# Altium footprint library Amin-Library.PcbLib: 601 footprints (part 12 of 38)
Each footprint in its own frame and in the unit in brackets; x right, y up, seen from the top. Pads: shape width x height; smd on the part's side, far side on the other; paste and mask are expansions set on the pad; w line width, h text height; cw(c..) or ccw(c..) is an arc to the next point about the centre after c.
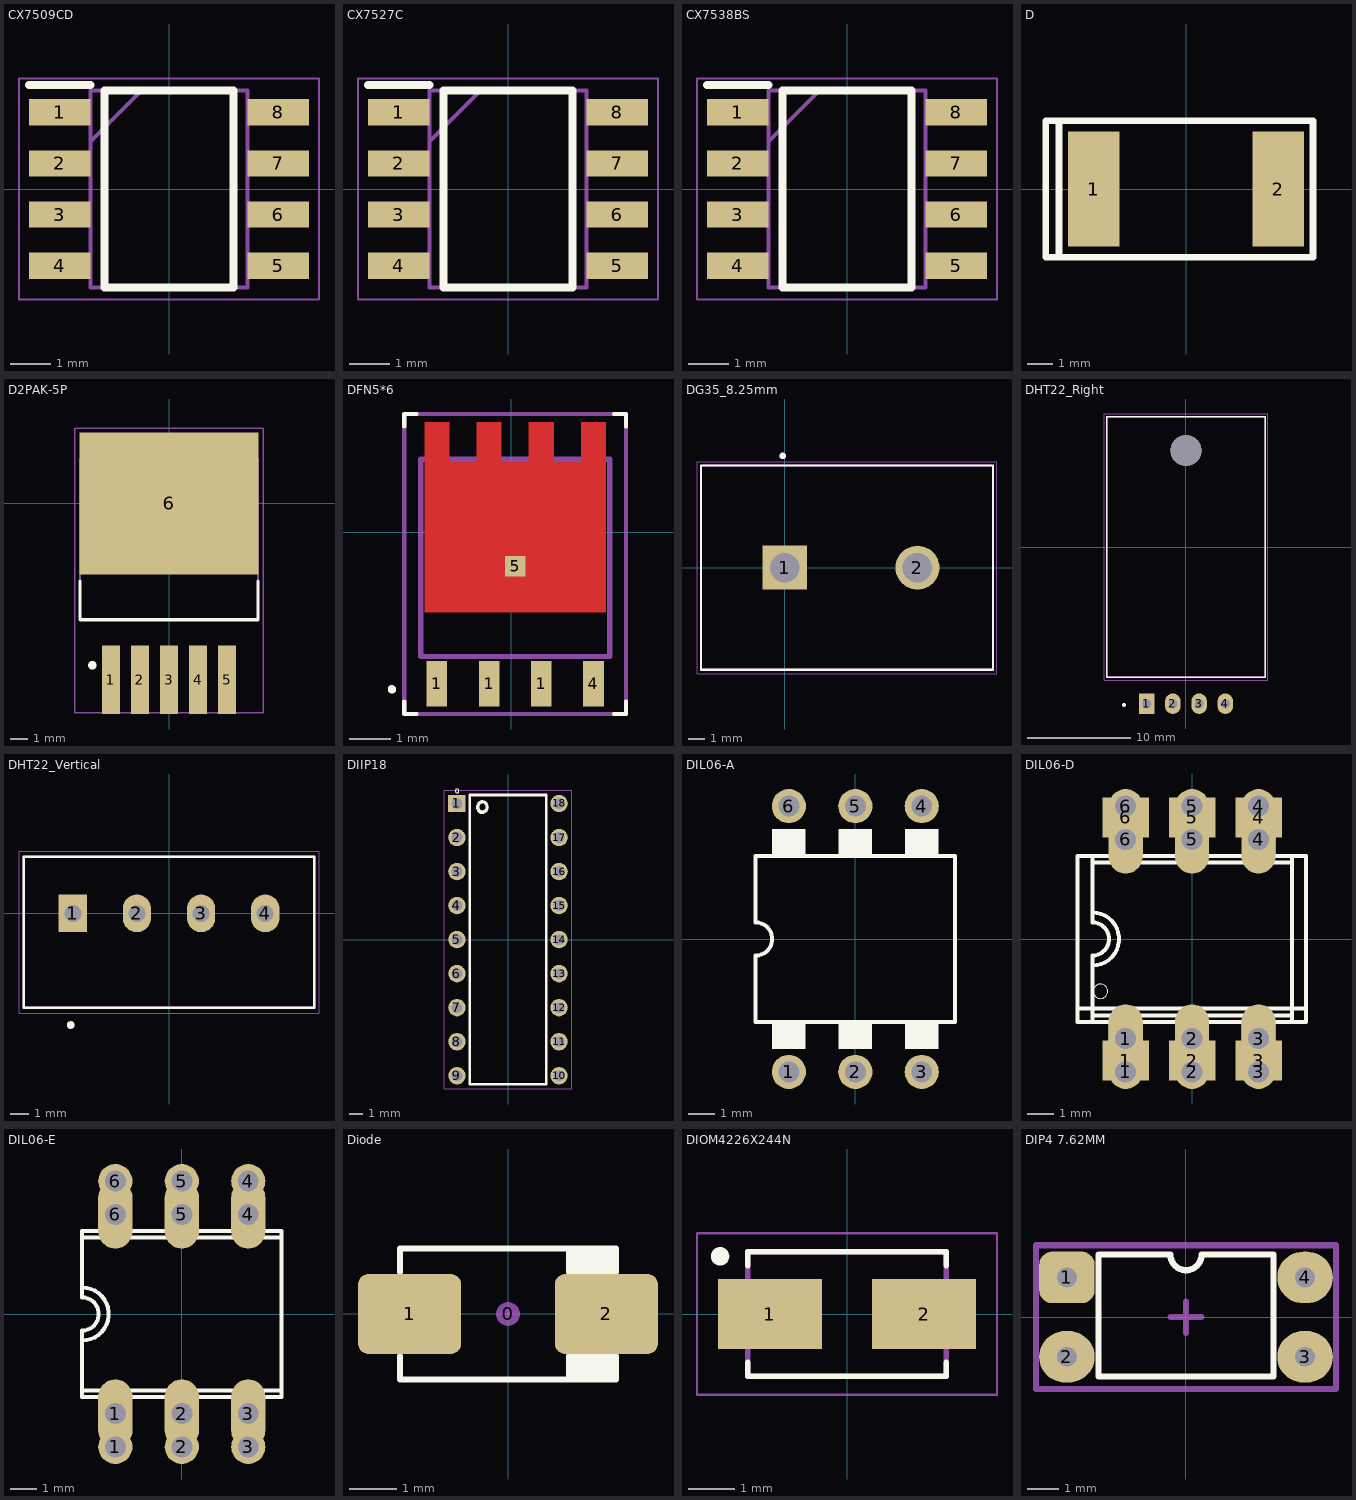
[diagram p11: the footprints below, top view; thin cyan lines are the x and y axes]

## CX7509CD [mm] "SOP8"
pads (8):
  rect 1.525x0.65 smd: 1(-2.712,1.905) 2(-2.712,0.635) 3(-2.712,-0.635) 4(-2.712,-1.905) 5(2.712,-1.905) 6(2.712,-0.635) 7(2.712,0.635) 8(2.712,1.905)
Top Overlay:
  lines w0.2: -3.475,2.58 -1.95,2.58 ; -1.6,-2.45 -1.6,2.45 1.6,2.45 1.6,-2.45 -1.6,-2.45
Mechanical 13:
  lines w0.1: -1.95,1.18 -0.68,2.45 ; -1.95,-2.45 -1.95,2.45 1.95,2.45 1.95,-2.45 -1.95,-2.45
Mechanical 15:
  lines w0.05: -3.725,-2.75 -3.725,2.75 3.725,2.75 3.725,-2.75 -3.725,-2.75
3D body "FR9886SOGTR.stp": height 1.75, standoff 0, extent -3,-2.45 3,2.45

## CX7527C [mm] "SOP8"
pads (8):
  rect 1.525x0.65 smd: 1(-2.712,1.905) 2(-2.712,0.635) 3(-2.712,-0.635) 4(-2.712,-1.905) 5(2.712,-1.905) 6(2.712,-0.635) 7(2.712,0.635) 8(2.712,1.905)
Top Overlay:
  lines w0.2: -3.475,2.58 -1.95,2.58 ; -1.6,-2.45 1.6,-2.45 1.6,2.45 -1.6,2.45 -1.6,-2.45
Mechanical 13:
  lines w0.1: -1.95,1.18 -0.68,2.45 ; -1.95,-2.45 1.95,-2.45 1.95,2.45 -1.95,2.45 -1.95,-2.45
Mechanical 15:
  lines w0.05: -3.725,-2.75 3.725,-2.75 3.725,2.75 -3.725,2.75 -3.725,-2.75
3D body "FR9886SOGTR.stp": height 1.75, standoff 0, extent -3,-2.45 3,2.45

## CX7538BS [mm] "SOP8"
pads (8):
  rect 1.525x0.65 smd: 1(-2.712,1.905) 2(-2.712,0.635) 3(-2.712,-0.635) 4(-2.712,-1.905) 5(2.712,-1.905) 6(2.712,-0.635) 7(2.712,0.635) 8(2.712,1.905)
Top Overlay:
  lines w0.2: -3.475,2.58 -1.95,2.58 ; -1.6,-2.45 -1.6,2.45 1.6,2.45 1.6,-2.45 -1.6,-2.45
Mechanical 13:
  lines w0.1: -1.95,1.18 -0.68,2.45 ; -1.95,-2.45 -1.95,2.45 1.95,2.45 1.95,-2.45 -1.95,-2.45
Mechanical 15:
  lines w0.05: -3.725,-2.75 -3.725,2.75 3.725,2.75 3.725,-2.75 -3.725,-2.75
3D body "FR9886SOGTR.stp": height 1.75, standoff 0, extent -3,-2.45 3,2.45

## D [mm]
pads (2):
  rect 2x4.5 smd: 1(-3.6,0) 2(3.6,0)
Top Overlay:
  lines w0.254: -4.953,-2.667 -4.166,-2.667 4.953,-2.667 4.953,2.667 -4.953,2.667 ; -4.953,-2.667 -5.461,-2.667 -5.461,2.667 -4.953,2.667 ; -4.953,-2.667 -4.953,2.667

## D2PAK-5P [mm]
height 9.45
pads (6):
  rect 1.05x4 smd: 1(-3.4,-10.3) 2(-1.7,-10.3) 3(0,-10.3) 4(1.7,-10.3) 5(3.4,-10.3)
  rect 10.45x8.3 smd paste-5: 6(0,0)
Top Overlay:
  circle w0.25: c-4.475,-9.45 r0.125
  lines w0.2: -5.2,-4.55 -5.2,-6.8 5.2,-6.8 5.2,-4.55
Top Paste:
  rectangle: -5,0.5 -0.5,4
  region: 5,4 0.5,4 0.5,0.5 5,0.5
  rectangle: -5,-4 -0.5,-0.5
  region: 5,-0.5 0.5,-0.5 0.5,-4 5,-4
Mechanical 13:
  lines w0.1: -5.2,-6.8 5.2,-6.8 5.2,2.6 -5.2,2.6 -5.2,-6.8
Mechanical 15:
  lines w0.1: -5.5,-12.225 5.5,-12.225 5.5,4.4 -5.5,4.4 -5.5,-12.225
3D body: height 4.65, standoff 0, extent -5.2,-6.8 5.2,2.6

## DFN5*6 [mm]
pads (5):
  rect 0.5x1.1 smd paste-1: 1(-1.805,-3.688) 1(-0.535,-3.688) 1(0.735,-3.688) 4(2.005,-3.688)
  rect 0.5x0.5 smd paste-1 mask+0: 5(0.1,-0.825)
Top Layer:
  region: -1.505,2.675 -1.505,1.7 -0.835,1.7 -0.835,2.675 -0.235,2.675 -0.235,1.7 0.435,1.7 0.435,2.675 1.035,2.675 1.035,1.7 1.705,1.7 1.705,2.675 2.305,2.675 2.305,-1.955 -2.105,-1.955 -2.105,2.675
Top Overlay:
  circle w0.1: c-2.9,-3.825 r0.05
  lines w0.1: -2.6,-4.125 -2.6,-4.425 -2.3,-4.425 ; -2.6,2.575 -2.6,2.875 -2.3,2.875 ; 2.5,-4.425 2.8,-4.425 2.8,-4.125 ; 2.5,2.875 2.8,2.875 2.8,2.575
Top Paste:
  region: 1.7,1.5 1.7,0 0.2,0 0.2,1.5
  region: 1.7,-0.2 1.7,-1.7 0.2,-1.7 0.2,-0.2
  region: 0,1.5 0,0 -1.5,0 -1.5,1.5
  region: 0,-0.2 0,-1.7 -1.5,-1.7 -1.5,-0.2
  region: 2.255,2.45 2.255,1.7 1.755,1.7 1.755,2.45
  region: 0.985,2.45 0.985,1.7 0.485,1.7 0.485,2.45
  region: -1.555,2.45 -1.555,1.7 -2.055,1.7 -2.055,2.45
  region: -0.285,2.45 -0.285,1.7 -0.785,1.7 -0.785,2.45
  region: 2.205,-3.276 2.205,-4.1 1.805,-4.1 1.805,-3.276
  region: 0.935,-3.276 0.935,-4.1 0.535,-4.1 0.535,-3.276
  region: -1.605,-3.276 -1.605,-4.1 -2.005,-4.1 -2.005,-3.276
  region: -0.335,-3.276 -0.335,-4.1 -0.735,-4.1 -0.735,-3.276
Top Solder:
  region: -1.405,2.775 -1.405,1.8 -0.935,1.8 -0.935,2.775 -0.135,2.775 -0.135,1.8 0.335,1.8 0.335,2.775 1.135,2.775 1.135,1.8 1.605,1.8 1.605,2.775 2.405,2.775 2.405,-2.055 -2.205,-2.055 -2.205,2.775
Mechanical 13:
  circle w0.1: c-2.9,-3.825 r0.05
  lines w0.127: -2.2,-3.025 -2.2,1.775 2.4,1.775 2.4,-3.025 -2.2,-3.025
Mechanical 15:
  lines w0.1: -0.4,-0.825 0.6,-0.825 ; 0.1,-1.325 0.1,-0.325 ; -2.6,-4.425 2.4,-4.425 2.8,-4.425 2.8,2.475 2.8,2.875 -2.6,2.875 -2.6,-4.425
3D body "BSC0901NSI.STEP": height 1.1, standoff 0, extent -2.475,-3.9 2.675,2.25

## DG35_8.25mm [mil]
pads (2):
  rect 108x108 hole 72: 1(0,0)
  round 108 hole 72: 2(325,0)
Top Overlay:
  circle w7.87: c-5,273.78 r3.94
  lines w5: -205,-250 510,-250 510,250 -205,250 -205,-250
Mechanical 13:
  circle w7.87: c-5,273.78 r3.94
  lines w5: -205,-250 510,-250 510,250 -205,250 -205,-250
Mechanical 15:
  lines w1.97: -214.84,-259.84 -214.84,259.84 519.84,259.84 519.84,-259.84 -214.84,-259.84
3D body "User Library-DG35C.step": height 590.55, standoff -196.85, extent -179.65,-275 489.64,276.18

## DHT22_Right [mm]
height 7.8
pads (5):
  rect 1.5x2 hole 0.9: 1(-3.81,-15.19)
  oval 1.5x2 hole 0.9: 2(-1.27,-15.19) 3(1.27,-15.19) 4(3.81,-15.19)
  round 3 hole 3 unplated: ""(0,9.35)
Top Overlay:
  circle w0.2: c-6.014,-15.317 r0.1
  lines w0.127: -7.7,-12.65 7.7,-12.65 7.7,12.65 -7.7,12.65 -7.7,-12.65
Mechanical 13:
  circle w0.2: c-6.014,-15.317 r0.1
  lines w0.127: -7.7,-12.65 7.7,-12.65 7.7,12.65 -7.7,12.65 -7.7,-12.65
Mechanical 15:
  lines w0.05: -7.95,-12.9 -7.95,12.9 7.95,12.9 7.95,-12.9 -7.95,-12.9
3D body "step_temp.STEP": height 7.8, standoff -2.76, extent -7.7,-15.44 7.7,12.65

## DHT22_Vertical [mm]
height 7.8
pads (4):
  rect 1.5x2 hole 0.9: 1(-5.1,0)
  oval 1.5x2 hole 0.9: 2(-1.7,0) 3(1.7,0) 4(5.1,0)
Top Overlay:
  circle w0.2: c-5.214,-5.917 r0.1
  lines w0.127: -7.7,-5 -7.7,3 7.7,3 7.7,-5 -7.7,-5
Mechanical 13:
  circle w0.2: c-5.214,-5.917 r0.1
  lines w0.127: -7.7,-5 -7.7,3 7.7,3 7.7,-5 -7.7,-5
Mechanical 15:
  lines w0.05: -7.95,-5.3 7.95,-5.3 7.95,3.3 -7.95,3.3 -7.95,-5.3
3D body "DHT22 sesor.SLDPRT": height 25, standoff -7, extent -7.8,-5 7.6,3

## DIIP18 [mm]
pads (18):
  rect 1.3x1.3 hole 0.8: 1(-3.81,10.16)
  round 1.3 hole 0.8: 2(-3.81,7.62) 3(-3.81,5.08) 4(-3.81,2.54) 5(-3.81,0) 6(-3.81,-2.54) 7(-3.81,-5.08) 8(-3.81,-7.62) 9(-3.81,-10.16) 10(3.81,-10.16) 11(3.81,-7.62) 12(3.81,-5.08) 13(3.81,-2.54) 14(3.81,0) 15(3.81,2.54) 16(3.81,5.08) 17(3.81,7.62) 18(3.81,10.16)
Top Overlay:
  circle w0.05: c-3.8,11.1 r0.141
  circle w0.05: c-1.9,9.9 r0.283
  circle w0.05: c-1.9,9.9 r0.283
  circle w0.05: c-1.9,9.9 r0.316
  circle w0.05: c-1.9,9.9 r0.361
  circle w0.05: c-1.9,9.9 r0.424
  circle w0.05: c-1.92,9.88 r0.426
  circle w0.05: c-1.92,9.89 r0.465
  lines w0.2: -2.85,-10.8 -2.85,10.8 2.85,10.8 2.85,-10.8 -2.85,-10.8
Mechanical 15:
  lines w0.05: -4.75,-11.15 -4.75,11.15 4.75,11.15 4.75,-11.15 -4.75,-11.15
3D body "DIP18.STEP": height 4.7, standoff -3.9, extent -4.572,-10.8 4.602,10.8

## DIL06-A [mm]
pads (6):
  round 1.308 hole 0.8: 1(-2.54,-5.08) 2(0,-5.08) 3(2.54,-5.08) 4(2.54,5.08) 5(0,5.08) 6(-2.54,5.08)
Top Overlay:
  region: 3.175,3.18 1.908,3.18 1.908,4.191 3.175,4.191
  region: 0.635,3.177 -0.636,3.177 -0.636,4.191 0.635,4.191
  region: -1.905,3.176 -3.176,3.176 -3.176,4.191 -1.905,4.191
  region: -1.905,-4.195 -3.178,-4.195 -3.178,-3.175 -1.905,-3.175
  region: 3.175,-4.192 1.905,-4.192 1.905,-3.175 3.175,-3.175
  region: 0.635,-4.193 -0.635,-4.193 -0.635,-3.175 0.635,-3.175
  lines w0.152: -3.81,-3.175 3.81,-3.175 ; -3.81,-3.175 -3.81,-0.635 ; -3.81,-3.175 3.81,-3.175 ; -3.81,-3.175 -3.81,-0.635 ; -3.81,-0.635 ccw(c-3.81,0) -3.81,0.635 ; -3.81,-0.635 ccw(c-3.81,0) -3.81,0.635 ; -3.81,0.635 -3.81,3.175 ; -3.81,0.635 -3.81,3.175 ; -3.81,3.175 3.81,3.175 ; -3.81,3.175 3.81,3.175 ; 3.81,-3.175 3.81,3.175 ; 3.81,-3.175 3.81,3.175

## DIL06-D [mm]
pads (18):
  round 1.308 hole 0.8: 1(-2.54,-5.08) 2(0,-5.08) 3(2.54,-5.08) 4(2.54,5.08) 5(0,5.08) 6(-2.54,5.08)
  rect 1.78x1.52 smd: 1(-2.54,-4.645) 2(0,-4.645) 3(2.54,-4.645) 4(2.54,4.645) 5(0,4.645) 6(-2.54,4.645)
  oval 1.308x2.616 hole 0.8: 1(-2.54,-3.81) 2(0,-3.81) 3(2.54,-3.81) 4(2.54,3.81) 5(0,3.81) 6(-2.54,3.81)
Top Overlay:
  circle w0: c-3.5,-2 r0.276
  region: 3.175,3.18 1.908,3.18 1.908,4.191 3.175,4.191
  region: 0.635,3.177 -0.636,3.177 -0.636,4.191 0.635,4.191
  region: -1.905,3.176 -3.176,3.176 -3.176,4.191 -1.905,4.191
  region: -1.905,-4.195 -3.178,-4.195 -3.178,-3.175 -1.905,-3.175
  region: 3.175,-4.192 1.905,-4.192 1.905,-3.175 3.175,-3.175
  region: 0.635,-4.193 -0.635,-4.193 -0.635,-3.175 0.635,-3.175
  lines w0.152: -4.285,-2.664 4.36,-2.664 ; -3.81,-3.175 3.81,-3.175 ; -3.81,-3.175 -3.81,-0.635 ; -3.81,-3.175 3.81,-3.175 ; -3.81,-3.175 -3.81,-0.635 ; -3.81,-2.921 -3.81,-1.016 ; -3.81,-2.921 3.81,-2.921 ; -3.81,-2.921 -3.81,-1.016 ; -3.81,-2.921 3.81,-2.921 ; -3.81,-1.016 ccw(c-3.81,0) -3.81,1.016 ; -3.81,-1.016 ccw(c-3.81,0) -3.81,1.016 ; -3.81,-0.635 ccw(c-3.81,0) -3.81,0.635 ; -3.81,-0.635 ccw(c-3.81,0) -3.81,0.635 ; -3.81,0.635 -3.81,3.175 ; -3.81,0.635 -3.81,3.175 ; -3.81,1.016 -3.81,2.921 ; -3.81,1.016 -3.81,2.921 ; -3.81,2.921 3.81,2.921 ; -3.81,2.921 3.81,2.921 ; -3.81,3.175 3.81,3.175 ; -3.81,3.175 3.81,3.175 ; 3.81,-3.175 3.81,3.175 ; 3.81,-3.175 3.81,3.175 ; 3.81,-2.921 3.81,2.921 ; 3.81,-2.921 3.81,2.921 ; 4.36,-2.664 4.36,-3.18 -4.385,-3.18 -4.385,3.18 4.36,3.18 4.36,-2.664
Mechanical 13:
  region: -1.935,3.202 -3.162,3.202 -3.162,4.95 -1.935,4.95
  region: 0.605,3.206 -0.621,3.206 -0.621,4.95 0.605,4.95
  region: 3.145,3.201 1.921,3.201 1.921,4.95 3.145,4.95
  region: 3.16,-4.96 1.939,-4.96 1.939,-3.2 3.16,-3.2
  region: 0.62,-4.951 -0.605,-4.951 -0.605,-3.2 0.62,-3.2
  region: -1.92,-4.952 -3.146,-4.952 -3.146,-3.2 -1.92,-3.2

## DIL06-E [mm]
pads (12):
  round 1.308 hole 0.8: 1(-2.54,-5.08) 2(0,-5.08) 3(2.54,-5.08) 4(2.54,5.08) 5(0,5.08) 6(-2.54,5.08)
  oval 1.308x2.616 hole 0.8: 1(-2.54,-3.81) 2(0,-3.81) 3(2.54,-3.81) 4(2.54,3.81) 5(0,3.81) 6(-2.54,3.81)
Top Overlay:
  region: 0.635,-4.193 -0.635,-4.193 -0.635,-3.175 0.635,-3.175
  region: 3.175,-4.192 1.905,-4.192 1.905,-3.175 3.175,-3.175
  region: -1.905,-4.195 -3.178,-4.195 -3.178,-3.175 -1.905,-3.175
  region: -1.905,3.176 -3.176,3.176 -3.176,4.191 -1.905,4.191
  region: 0.635,3.177 -0.636,3.177 -0.636,4.191 0.635,4.191
  region: 3.175,3.18 1.908,3.18 1.908,4.191 3.175,4.191
  lines w0.152: -3.81,-3.175 -3.81,-0.635 ; -3.81,-3.175 3.81,-3.175 ; -3.81,-3.175 -3.81,-0.635 ; -3.81,-3.175 3.81,-3.175 ; -3.81,-2.921 3.81,-2.921 ; -3.81,-2.921 -3.81,-1.016 ; -3.81,-2.921 3.81,-2.921 ; -3.81,-2.921 -3.81,-1.016 ; -3.81,-1.016 ccw(c-3.81,0) -3.81,1.016 ; -3.81,-1.016 ccw(c-3.81,0) -3.81,1.016 ; -3.81,-0.635 ccw(c-3.81,0) -3.81,0.635 ; -3.81,-0.635 ccw(c-3.81,0) -3.81,0.635 ; -3.81,0.635 -3.81,3.175 ; -3.81,0.635 -3.81,3.175 ; -3.81,1.016 -3.81,2.921 ; -3.81,1.016 -3.81,2.921 ; -3.81,2.921 3.81,2.921 ; -3.81,2.921 3.81,2.921 ; -3.81,3.175 3.81,3.175 ; -3.81,3.175 3.81,3.175 ; 3.81,-3.175 3.81,3.175 ; 3.81,-3.175 3.81,3.175 ; 3.81,-2.921 3.81,2.921 ; 3.81,-2.921 3.81,2.921

## Diode [mm] "JEDEC DO-214 variation AC. SMA"
height 2.5
pads (3):
  round 0.508 on Mech15: 0(0,0)
  rrect25% 2.2x1.7 smd: 1(-2.1,0) 2(2.1,0)
Top Overlay:
  rectangle: 1.3,0.9 2.3,1.4
  rectangle: 1.3,-1.4 2.3,-0.9
  lines w0.127: -2.3,-0.9 -2.3,-1.4 2.3,-1.4 2.3,-0.9 1.3,-0.9 1.3,-1.4 ; -2.3,0.9 -2.3,1.4 2.3,1.4 2.3,0.9 1.3,0.9 ; 1.3,0.911 1.3,1.4
3D body "SW3dPS-DO-214AC SMA.STEP": height 2.42, standoff 0.02, extent -2.6,-1.3 2.6,1.3

## DIOM4226X244N [mm]
pads (2):
  rect 2.26x1.51 smd: 1(-1.67,0) 2(1.67,0)
Top Overlay:
  circle w0.2: c-2.75,1.25 r0.1
  lines w0.127: -2.15,-1.05 -2.15,-1.35 2.15,-1.35 2.15,-1.05 ; -2.15,1.05 -2.15,1.35 2.15,1.35 2.15,1.05
Mechanical 13:
  lines w0.127: -2.15,-1.35 2.15,-1.35 2.15,1.35 -2.15,1.35 -2.15,-1.35
Mechanical 15:
  lines w0.05: -3.25,-1.75 3.25,-1.75 3.25,1.75 -3.25,1.75 -3.25,-1.75

## DIP4 7.62MM [mil] "Designed by Siavash bolhasani"
height 1300
pads (4):
  rrect50% 70x65 hole 25 mask+0: 1(-150,50)
  oval 70x65 hole 25 mask+0: 2(-150,-50) 3(150,-50) 4(150,50)
Top Overlay:
  lines w7.87: -110.24,-74.8 -110.24,78.74 -19.68,78.74 ccw(c0,78.74) 19.69,78.74 110.24,78.74 110.24,-74.8 -110.24,-74.8
Mechanical 15:
  lines w3.94: -19.68,0 19.69,0 ; 0,-19.69 0,0 0,19.68
  lines w7.87: -19.68,0 19.69,0 ; 0,-19.69 0,19.68 ; -188.98,-90.55 -188.98,90.55 98.43,90.55 188.98,90.55 188.98,-90.55 -188.98,-90.55
3D body "User Library-DIP4-7_62-2_54.step": height 149.61, standoff -125.98, extent -155.12,-90.36 155.12,90.36